# Altium footprint library CoilcraftPCB.PcbLib: 320 footprints (part 9 of 20)
Each footprint in its own frame and in the unit in brackets; x right, y up, seen from the top. Pads: shape width x height; smd on the part's side, far side on the other; paste and mask are expansions set on the pad; w line width, h text height; cw(c..) or ccw(c..) is an arc to the next point about the centre after c.
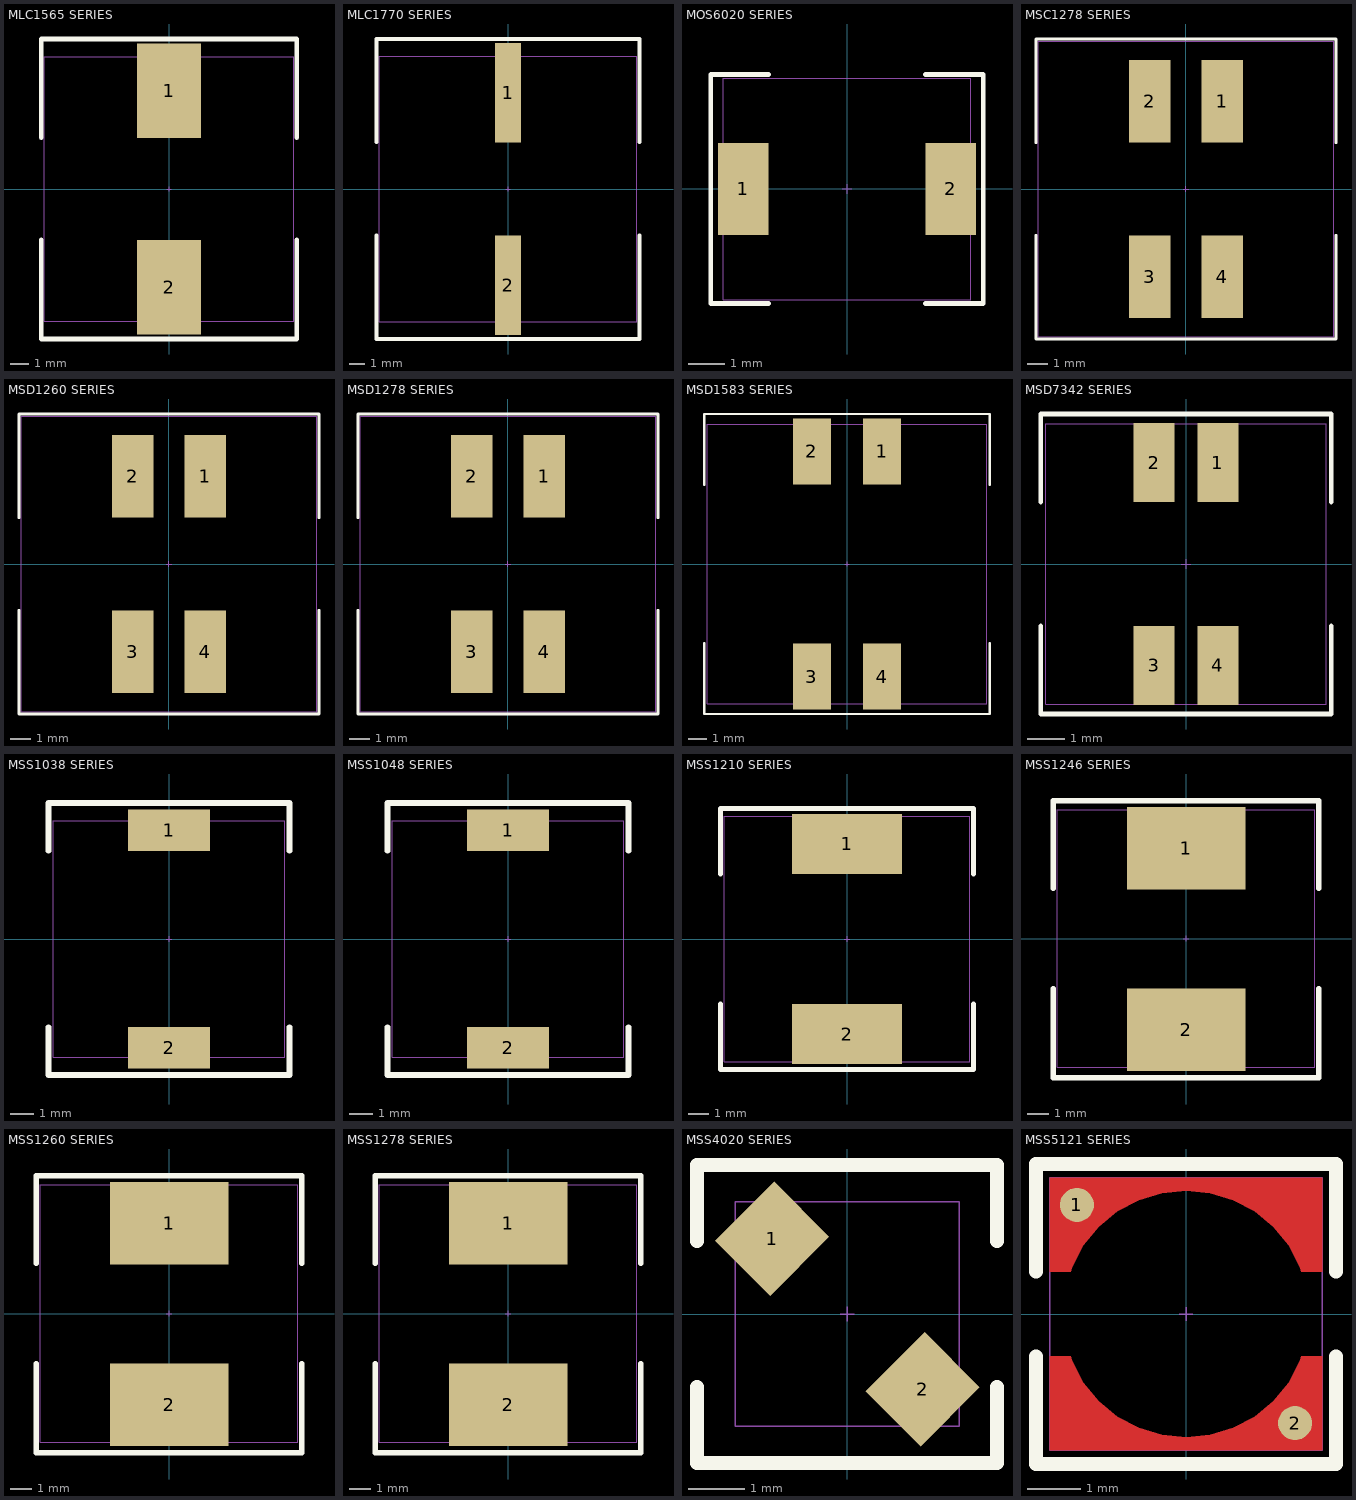
[diagram p8: the footprints below, top view; thin cyan lines are the x and y axes]

## MLC1565 SERIES [mm] "Coilcraft Shielded Power Inductors"
height 6.5
pads (2):
  rect 3.4x5 smd: 1(0,5.2) 2(0,-5.2)
Top Overlay:
  lines w0.254: -6.769,-2.692 -6.769,-7.95 6.769,-7.95 6.769,-2.692 ; -6.769,2.718 -6.769,7.95 6.769,7.95 6.769,2.718
Mechanical 13:
  lines w0.025: -0.127,0 0.127,0 ; 0,-0.127 0,0.127
Mechanical 14:
  lines w0.025: -6.6,-7 -6.6,7 6.6,7 6.6,-7 -6.6,-7
3D body: height 5.53, standoff 0.02, extent -6.6,-7 6.6,7

## MLC1770 SERIES [mil] "Coilcraft Shielded Power Inductors"
height 276
pads (2):
  rect 65x248 smd: 1(0,240) 2(0,-240)
Top Overlay:
  lines w10: -327.5,-116.5 -327.5,-374 327.5,-374 327.5,-116.5 ; -327.5,117 -327.5,374 327.5,374 327.5,117
Mechanical 13:
  lines w1: -5,0 5,0 ; 0,-5 0,5
Mechanical 14:
  lines w1: -321,-330.5 -321,330.5 321,330.5 321,-330.5 -321,-330.5
3D body: height 274.62, standoff -0.97, extent -320.87,-330.71 320.86,330.7

## MOS6020 SERIES [mil] "Coilcraft Shielded Power Inductors"
height 95
pads (2):
  rect 55x100 smd: 1(-112.5,0) 2(112.5,0)
Top Overlay:
  lines w5: -85,-124 -147.5,-124 -147.5,124 -85,124 ; 85,-124 147.5,-124 147.5,124 85,124
Mechanical 13:
  lines w1: -5,0 5,0 ; 0,-5 0,5
Mechanical 14:
  lines w1: -134,-120 134,-120 134,120 -134,120 -134,-120
3D body: height 94.49, standoff 0, extent -133.86,-118.11 133.86,118.11

## MSC1278 SERIES [mil] "Coilcraft Coupled Inductors"
height 317
pads (4):
  rect 79x157 smd: 1(69,167) 2(-69,167) 3(-69,-167) 4(69,-167)
Top Overlay:
  lines w5: -286,-88.5 -286,-286 286,-286 286,-88.5 ; -286,88.5 -286,286 286,286 286,88.5
Mechanical 13:
  lines w1: -5,0 5,0 ; 0,-5 0,5
Mechanical 14:
  lines w1: -282,-282 282,-282 282,282 -282,282 -282,-282
3D body: height 317.06, standoff 0.13, extent -240.16,-240.16 240.15,240.15

## MSD1260 SERIES [mil] "Coilcraft Coupled Inductors"
height 236
pads (4):
  rect 79x157 smd: 1(69,167) 2(-69,167) 3(-69,-167) 4(69,-167)
Top Overlay:
  lines w5: -286,-88.5 -286,-286 286,-286 286,-88.5 ; -286,88.5 -286,286 286,286 286,88.5
Mechanical 13:
  lines w1: -5,0 5,0 ; 0,-5 0,5
Mechanical 14:
  lines w1: -282,-282 282,-282 282,282 -282,282 -282,-282
3D body: height 244.22, standoff 0.13, extent -240.16,-240.16 240.15,240.15

## MSD1278 SERIES [mil] "Coilcraft Coupled Inductors"
height 317
pads (4):
  rect 79x157 smd: 1(69,167) 2(-69,167) 3(-69,-167) 4(69,-167)
Top Overlay:
  lines w5: -286,-88.5 -286,-286 286,-286 286,-88.5 ; -286,88.5 -286,286 286,286 286,88.5
Mechanical 13:
  lines w1: -5,0 5,0 ; 0,-5 0,5
Mechanical 14:
  lines w1: -282,-282 -282,282 282,282 282,-282 -282,-282
3D body: height 317.06, standoff 0.13, extent -240.16,-240.16 240.15,240.15

## MSD1583 SERIES [mil] "Coilcraft Coupled Inductors"
height 339
pads (4):
  rect 79x138 smd: 1(73,234.5) 2(-73,234.5) 3(-73,-234.5) 4(73,-234.5)
Top Overlay:
  lines w5: -297.5,-165.5 -297.5,-312.5 297.5,-312.5 297.5,-165.5 ; -297.5,165.5 -297.5,312.5 297.5,312.5 297.5,165.5
Mechanical 13:
  lines w1: -5,0 5,0 ; 0,-5 0,5
Mechanical 14:
  lines w1: -291.5,-291.5 -291.5,291.5 291.5,291.5 291.5,-291.5 -291.5,-291.5
3D body: height 338.61, standoff 0.03, extent -297.25,-297.24 297.24,297.25

## MSD7342 SERIES [mil] "Coilcraft Coupled Inductors"
height 181
pads (4):
  rect 43x83 smd: 1(33.5,106.5) 2(-33.5,106.5) 3(-33.5,-106.5) 4(33.5,-106.5)
Top Overlay:
  lines w5: -152.5,-65 -152.5,-157.5 152.5,-157.5 152.5,-65 ; -152.5,65 -152.5,157.5 152.5,157.5 152.5,65
Mechanical 13:
  lines w1: -5,0 5,0 ; 0,-5 0,5
Mechanical 14:
  lines w1: -147.5,-147.5 147.5,-147.5 147.5,147.5 -147.5,147.5 -147.5,-147.5
3D body: height 181.23, standoff 0.13, extent -146.66,-146.66 146.65,146.65

## MSS1038 SERIES [mil] "Coilcraft Shielded Power Inductors"
height 150
pads (2):
  rect 140x70 smd: 1(0,185) 2(0,-185)
Top Overlay:
  lines w10: -205,-150 -205,-231.5 205,-231.5 205,-150 ; -205,150 -205,231.5 205,231.5 205,150
Mechanical 13:
  lines w1: -5,0 5,0 ; 0,-5 0,5
Mechanical 14:
  lines w1: -197,-201 -197,201 197,201 197,-201 -197,-201
3D body: height 157.54, standoff 0.06, extent -200.79,-202.76 200.78,202.75

## MSS1048 SERIES [mil] "Coilcraft Shielded Power Inductors"
height 189
pads (2):
  rect 140x70 smd: 1(0,185) 2(0,-185)
Top Overlay:
  lines w10: -205,-150 -205,-231.5 205,-231.5 205,-150 ; -205,150 -205,231.5 205,231.5 205,150
Mechanical 13:
  lines w1: -5,0 5,0 ; 0,-5 0,5
Mechanical 14:
  lines w1: -197,-201 197,-201 197,201 -197,201 -197,-201
3D body: height 200.85, standoff 0.06, extent -200.79,-202.76 200.78,202.75

## MSS1210 SERIES [mil] "Coilcraft Shielded Power Inductors"
height 394
pads (2):
  rect 217x118 smd: 1(0,187.5) 2(0,-187.5)
Top Overlay:
  lines w10: -250,-128.5 -250,-257.5 250,-257.5 250,-128.5 ; -250,128.5 -250,257.5 250,257.5 250,128.5
Mechanical 13:
  lines w1: -5,0 5,0 ; 0,-5 0,5
Mechanical 14:
  lines w1: -242,-242 -242,242 242,242 242,-242 -242,-242
3D body: height 402, standoff 0.62, extent -242.13,-242.13 242.12,242.12

## MSS1246 SERIES [mil] "Coilcraft Shielded Power Inductors"
height 181
pads (2):
  rect 217x151 smd: 1(0,165.7) 2(0,-167.5)
Top Overlay:
  lines w10: -244,-92.5 -244,-255 243.5,-255 243.5,-92.5 ; -244,92.5 -244,252.5 243.5,252.5 243.5,92.5
Mechanical 13:
  lines w1: -5,0 5,0 ; 0,-5 0,5
Mechanical 14:
  lines w1: -236,-236 236,-236 236,236 -236,236 -236,-236
3D body: height 189.1, standoff 0.13, extent -240.16,-240.16 240.15,240.15

## MSS1260 SERIES [mil] "Coilcraft Shielded Power Inductors"
height 240
pads (2):
  rect 217x151 smd: 1(0,165.7) 2(0,-167.5)
Top Overlay:
  lines w10: -244,-92.5 -244,-255 243.5,-255 243.5,-92.5 ; -244,92.5 -244,252.5 243.5,252.5 243.5,92.5
Mechanical 13:
  lines w1: -5,0 5,0 ; 0,-5 0,5
Mechanical 14:
  lines w1: -236,-236 -236,236 236,236 236,-236 -236,-236
3D body: height 246.09, standoff 0.62, extent -242.13,-242.13 242.12,242.12

## MSS1278 SERIES [mil] "Coilcraft Shielded Power Inductors"
height 307
pads (2):
  rect 217x151 smd: 1(0,165.7) 2(0,-167.5)
Top Overlay:
  lines w10: -244,-92.5 -244,-255 243.5,-255 243.5,-92.5 ; -244,92.5 -244,252.5 243.5,252.5 243.5,92.5
Mechanical 13:
  lines w1: -5,0 5,0 ; 0,-5 0,5
Mechanical 14:
  lines w1: -236,-236 -236,236 236,236 236,-236 -236,-236
3D body: height 318.93, standoff 0.62, extent -242.13,-242.13 242.12,242.12

## MSS4020 SERIES [mil] "Coilcraft Shielded Power Inductors"
height 79
pads (2):
  rect 59x55 smd rot 45: 1(-53.03,53.03) 2(53.03,-53.03)
Top Overlay:
  lines w10: -106,-51.5 -106,-105 105.5,-105 105.5,-51.5 ; -106,51.5 -106,105 105.5,105 105.5,51.5
Mechanical 13:
  lines w1: -5,0 5,0 ; 0,-5 0,5
Mechanical 14:
  lines w1: -79,-79 79,-79 79,79 -79,79 -79,-79
3D body: height 78.8, standoff 0.06, extent -77.32,-77.32 77.32,77.32

## MSS5121 SERIES [mil] "Coilcraft Shielded Power Inductors"
height 83
pads (2):
  round 25 smd mask+0: 1(-80,80) 2(80,-80)
Top Layer:
  region: -100,31 -84.49,31 -84.63,31.05 -83.55,34.61 -75.19,50.24 -63.95,63.95 -50.24,75.19 -34.61,83.55 -17.64,88.7 0,90.44 17.64,88.7 34.61,83.55 50.24,75.19 63.95,63.95 75.19,50.24 83.55,34.61 84.63,31.05 84.49,31 100,31 100,100 -100,100
  region: 100,-31 84.49,-31 84.63,-31.05 83.55,-34.61 75.19,-50.24 63.95,-63.95 50.24,-75.19 34.61,-83.55 17.64,-88.7 0,-90.44 -17.64,-88.7 -34.61,-83.55 -50.24,-75.19 -63.95,-63.95 -75.19,-50.24 -83.55,-34.61 -84.63,-31.05 -84.49,-31 -100,-31 -100,-100 100,-100
Top Overlay:
  lines w10: -110,-31 -110,-110 110,-110 110,-31 ; -110,31 -110,110 110,110 110,31
Top Paste:
  region: 100,-31 84.49,-31 84.63,-31.05 83.55,-34.61 75.19,-50.24 63.95,-63.95 50.24,-75.19 34.61,-83.55 17.64,-88.7 0,-90.44 -17.64,-88.7 -34.61,-83.55 -50.24,-75.19 -63.95,-63.95 -75.19,-50.24 -83.55,-34.61 -84.63,-31.05 -84.49,-31 -100,-31 -100,-100 100,-100
  region: -100,31 -84.49,31 -84.63,31.05 -83.55,34.61 -75.19,50.24 -63.95,63.95 -50.24,75.19 -34.61,83.55 -17.64,88.7 0,90.44 17.64,88.7 34.61,83.55 50.24,75.19 63.95,63.95 75.19,50.24 83.55,34.61 84.63,31.05 84.49,31 100,31 100,100 -100,100
Mechanical 13:
  lines w1: -5,0 5,0 ; 0,-5 0,5
Mechanical 14:
  lines w1: -100,-100 -100,100 100,100 100,-100 -100,-100
3D body: height 86.74, standoff 0.13, extent -106.24,-106.24 106.24,106.24